# Altium schematic symbol library TitansLib.SchLib: 462 symbols (part 21 of 24)
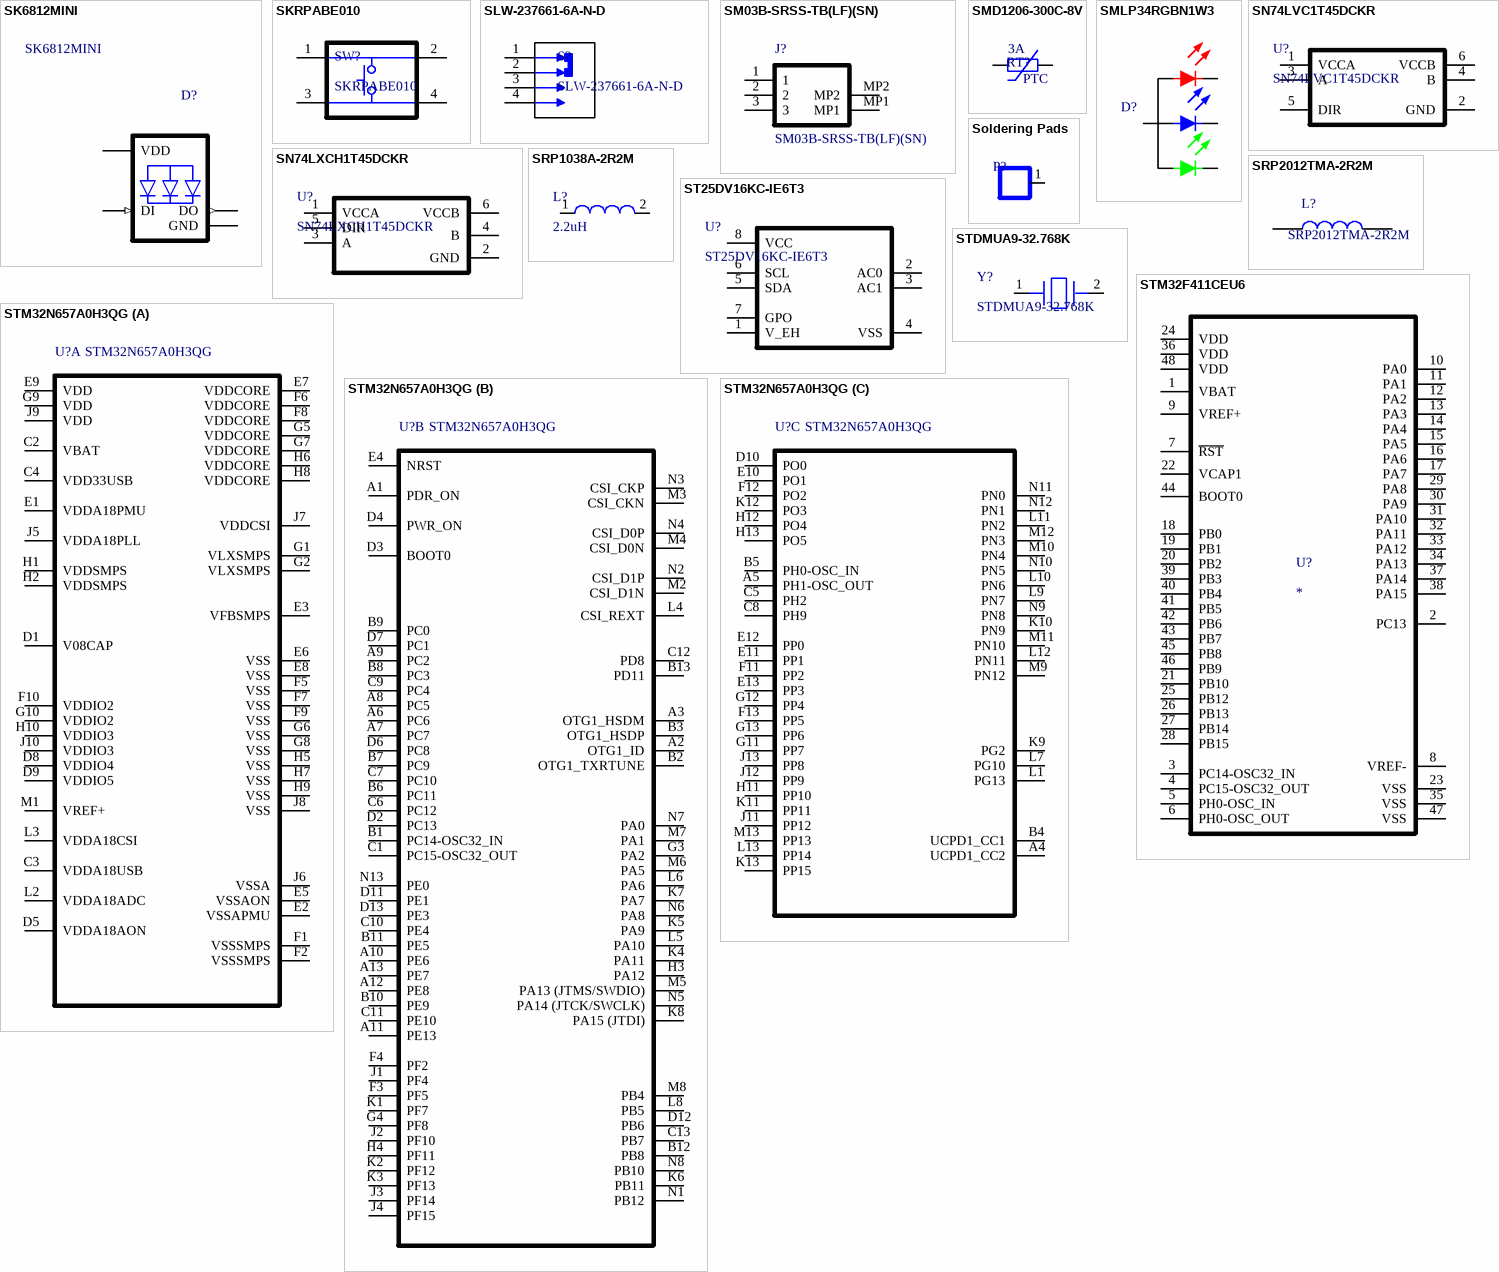
[diagram p37: symbols SK6812MINI to STM32N657A0H3QG]

## SLW-237661-6A-N-D
designator S?
Switch Slide ON ON ON SP3T Raised Slide 0.5A 50VDC 10000Cycles PC Pins Thru-Hole; MF: Same Sky; Number of Positions: 3; SnapEDA_Link: https://www.snapeda.com/parts/SLW-237661-6A-N-D/Same+Sky/view-part/?ref=snap; Package: Package; Value: *; MP: SLW-237661-6A-N-D; Check_prices: https://www.snapeda.com/parts/SLW-237661-6A-N-D/Same+Sky/view-part/?ref=eda; Supplier 1: DigiKey; Supplier Part Number 1: 2223-SLW-237661-6A-N-D-ND; Supplier 2: Mouser; Supplier Part Number 2: 179-SLW2376616AND; Supplier: DigiKey; Supplier Part Number: 2223-SLW-237661-6A-N-D-ND; Manufacturer: Same Sky; Manufacturer Part Number: SLW-237661-6A-N-D; RoHS: Compliant; Category: Slide Switches; Stock: 1241; Pricing: 1=0,45, 10=0,385, 25=0,3588, 100=0,3209, 250=0,29732, 500=0,2806, 1000=0,26508, 2500=0,24654, 5000=0,23406 (USD); Lifecycle Status: Production; REACH SVHC: Yes; ComponentLink1URL: https://datasheet.octopart.com:443/SLW-237661-6A-N-D-Same-Sky-datasheet-188843315.pdf?src-supplier=Same+Sky; ComponentLink1Description: https://datasheet.octopart.com:443/SLW-237661-6A-N-D-Same-Sky-datasheet-188843315.pdf?src-supplier=Same+Sky; ComponentLink2URL: https://datasheet.octopart.com:443/SLW-237661-6A-N-D-Same-Sky-datasheet-181919987.pdf?src-supplier=Same+Sky; ComponentLink2Description: https://datasheet.octopart.com:443/SLW-237661-6A-N-D-Same-Sky-datasheet-181919987.pdf?src-supplier=Same+Sky; ComponentLink3URL: https://datasheet.octopart.com:443/SLW-237661-6A-N-D-Same-Sky-datasheet-181919988.pdf?src-supplier=Same+Sky; ComponentLink3Description: https://datasheet.octopart.com:443/SLW-237661-6A-N-D-Same-Sky-datasheet-181919988.pdf?src-supplier=Same+Sky; ComponentLink4URL: https://datasheet.octopart.com:443/SLW-237661-6A-N-D-Same-Sky-datasheet-187907087.pdf?src-supplier=Master+Electronics; ComponentLink4Description: https://datasheet.octopart.com:443/SLW-237661-6A-N-D-Same-Sky-datasheet-187907087.pdf?src-supplier=Master+Electronics; ComponentLink5URL: https://datasheet.octopart.com:443/SLW-237661-6A-N-D-Same-Sky-datasheet-188930936.pdf?src-supplier=TME; ComponentLink5Description: https://datasheet.octopart.com:443/SLW-237661-6A-N-D-Same-Sky-datasheet-188930936.pdf?src-supplier=TME; ComponentLink6URL: https://octopart.com:443/opatz8j6/c1?t=8VmR57qYqZFzUCwjfwF_bp8m6JuYStFWSxgYKb2KmZYFUQYu35G3Mr7DNbX4FHYCMI8oReld9tViGdxjX3NbNbFGgfNcf7B61Q12uKcFXCvXZ4vwcgaowTwEQBiYxdkGS8k8Zg4YENuxHQUxI7FNZMPyKdAXuIKjEn-TT_c2HAbh59xYTp1iHVKx3RFb70iK0Zcqlq2flhOVkGlHn2Nfd12VimO5IFTjlUn-mP1NsdE3qS1rzAeuI5--aTga4DrNEoiPtC4zE42i93sm7OhU0IK7p-wXkn5M_VylD1MTowfgw9xzP495MZzSfEjA3EBr3b9OxaVEki3RN3auUTfzeSg2CT77e_rS7BXPsLVVp2i2lQ&src-supplier=Compliance+Statements; ComponentLink6Description: https://octopart.com:443/opatz8j6/c1?t=8VmR57qYqZFzUCwjfwF_bp8m6JuYStFWSxgYKb2KmZYFUQYu35G3Mr7DNbX4FHYCMI8oReld9tViGdxjX3NbNbFGgfNcf7B61Q12uKcFXCvXZ4vwcgaowTwEQBiYxdkGS8k8Zg4YENuxHQUxI7FNZMPyKdAXuIKjEn-TT_c2HAbh59xYTp1iHVKx3RFb70iK0Zcqlq2flhOVkGlHn2Nfd12VimO5IFTjlUn-mP1NsdE3qS1rzAeuI5--aTga4DrNEoiPtC4zE42i93sm7OhU0IK7p-wXkn5M_VylD1MTowfgw9xzP495MZzSfEjA3EBr3b9OxaVEki3RN3auUTfzeSg2CT77e_rS7BXPsLVVp2i2lQ&src-supplier=Compliance+Statements; ComponentLink7URL: https://octopart.com:443/opatz8j6/c1?t=AZK7bskjWbm11iZNnGpfdb6_Q6h8MakJeavAaVBavs5Uh-JSDuNRoUuF82tE1NPecDxPSVxQiQXRK5PviMJ7CbBucgg_ebF37rz9sMILUO-WnpZZuA7SZCi4vSpJ6B5tDMk3_Klva_iG8PQUIowosImMaPA_vNSPcVevJkmiCvDymj1uv4rAgumFo92n7RxdXdHsTws24BVi-VG6QquDPYTnGBuGJZOftetvyH8ySqM4a1qs4NJmmuZXZbWHpKmLM2lMWCUIt6_bDBVLt25wBJRfIt7nPLGp6zSCT6Db85bpnQ2QXRXe3bpQW5JcuKS1-GM65dyXJ8xuhrQ2VHD_y_xMppbagHEE8FBl8_ZBcA8SUQ&src-supplier=Compliance+Statements; ComponentLink7Description: https://octopart.com:443/opatz8j6/c1?t=AZK7bskjWbm11iZNnGpfdb6_Q6h8MakJeavAaVBavs5Uh-JSDuNRoUuF82tE1NPecDxPSVxQiQXRK5PviMJ7CbBucgg_ebF37rz9sMILUO-WnpZZuA7SZCi4vSpJ6B5tDMk3_Klva_iG8PQUIowosImMaPA_vNSPcVevJkmiCvDymj1uv4rAgumFo92n7RxdXdHsTws24BVi-VG6QquDPYTnGBuGJZOftetvyH8ySqM4a1qs4NJmmuZXZbWHpKmLM2lMWCUIt6_bDBVLt25wBJRfIt7nPLGp6zSCT6Db85bpnQ2QXRXe3bpQW5JcuKS1-GM65dyXJ8xuhrQ2VHD_y_xMppbagHEE8FBl8_ZBcA8SUQ&src-supplier=Compliance+Statements
footprint SW_SLW-237661-6A-N-D
pins: 1, 2, 3, 4

## SM03B-SRSS-TB(LF)(SN)
designator J?
Headers & Wire Housings SR HEADER (SMT SIDE; Manufacturer 1: JST; Suppler Unit Price 1: 0.76; Datasheet: https://www.mouser.com/datasheet/3/1070/1/eSR_SZ.pdf; Height: 2.9mm; Manufacturer Part Number 1: SM03B-SRSS-TB(LF)(SN); Supplier Part Number 1: 306-SM03BSRSSTBLFSNP; Supplier 1: Mouser; Supplier Link 1: https://www.mouser.com/ProductDetail/JST-Commercial/SM03B-SRSS-TBLFSN?qs=cdbOS8ANM9DY%2Fg%2FPQv5Kng%3D%3D&srsltid=AfmBOopfIpsxvT8dLfiZVy8RRoHGpUzlDbmxgDkX76WziTOqbMIDqSse
footprint SM03BSRSSTBLFSN
pins: 1, 2, 3, MP1, MP2

## SMD1206-300C-8V
designator RT?, comment 3A
PTC RESET FUSE 8V 3A 1206; Manufacturer: BNStar; Manufacturer Part Number: SMD1206-300C-8V; Supplier Part Number: C2760277; Supplier Unit Price: 0.044; Supplier: LCSC; Supplier Link: https://www.lcsc.com/product-detail/C2760277.html?spm=wm.fly.bg.0.xh&lcsc_vid=RlMKX1cDFlQIVwFVR1VaUgJQQ1MIVlJQQlAMAl1TE1AxVlNeQ1BaX1RWR1VWVjsOAxUeFF5JWBYZEEoBGA4JCwFIFA4DSA%3D%3D; Value: 3A
footprint PTC_3A_1206
pins: 1, 2
text: PTC

## SMLP34RGBN1W3
designator D?  (value not drawn)
Triple Color LED, Ultra Hi-brt Red/ultra Hi-brt Green/ultra Hi-brt Blue, Milky White, 1mm; Manufacturer: ROHM; Forward Current: 10mA; Forward Voltage: 1.9V; Number of Circuits: 1; Reverse Voltage: 5V; Shape: Square; Supplier 1: DigiKey; Supplier Part Number 1: 846-SMLP34RGBN1W3CT-ND; Supplier 2: DigiKey; Supplier Part Number 2: 846-SMLP34RGBN1W3DKR-ND; Supplier 3: Mouser; Supplier Part Number 3: 755-SMLP34RGBN1W3; Supplier: DigiKey; Supplier Part Number: 846-SMLP34RGBN1W3CT-ND; Manufacturer Part Number: SMLP34RGBN1W3; RoHS: Compliant; Category: LEDs; Stock: 31242; Pricing: 1=1,12, 10=0,812, 25=0,734, 100=0,6483, 250=0,60736, 500=0,58266, 1000=0,56234, 2500=0,54089 (USD); Export Control Classification Number (ECCN) Code: EAR99; Height: 200µm; Harmonized Tariff Schedule (HTS) Code: 8541.40.20.00; Introduction Date: 2021-07-13; Lifecycle Status: Production; Max Operating Temperature: 85°C; Min Operating Temperature: -40°C; Mounting Technology: Surface Mount; Number of Terminals: 4; REACH SVHC: Yes; Terminal Pitch: 650µm; ComponentLink1URL: https://datasheet.octopart.com:443/SMLP34RGBN1W3-ROHM-datasheet-181230668.pdf?src-supplier=IHS; ComponentLink1Description: https://datasheet.octopart.com:443/SMLP34RGBN1W3-ROHM-datasheet-181230668.pdf?src-supplier=IHS; ComponentLink2URL: https://datasheet.octopart.com:443/SMLP34RGBN1W3-ROHM-datasheet-181962876.pdf?src-supplier=Farnell; ComponentLink2Description: https://datasheet.octopart.com:443/SMLP34RGBN1W3-ROHM-datasheet-181962876.pdf?src-supplier=Farnell
pins: 1 31, 2 32, 3 32, 4 32

## SN74LVC1T45DCKR
designator U?
Bus Transceiver, LVC/LCX/Z Series, 1-Func, 1-Bit, True Output, CMOS, PDSO6; Manufacturer: Texas Instruments; Package Body Material: Plastic; Control Type: COMMON CONTROL; Count Direction: Bidirectional; Load/Preset Input: Yes; Max I(ol): 24mA; Number of Bits: 1; Number of Ports: 2; Output Characteristics: 3-STATE; Package Equivalence Code: TSSOP6,.08; Power Supplies: 3.3V; Propagation Delay (tpd): 17.7ns; Max Supply Voltage: 5.5V; Min Supply Voltage: 1.65V; Nominal Supply Voltage: 1.8V; Qualification Status: Not Qualified; Supplier: Digikey; Supplier Part Number: 296-16844-1-ND; Manufacturer Part Number: SN74LVC1T45DCKR; RoHS: Yes; Category: Voltage Level Shifters; Stock: 137404; Pricing: 1=0.46, 10=0.323, 25=0.288, 100=0.2498, 250=0.23164, 500=0.22064, 1000=0.21267 (USD); Case/Package: TSSOP; Pins: 6; Package Shape: Rectangular; Terminal Finish: Nickel; Min Operating Temperature: -40°C; Max Operating Temperature: 85°C; JESD-609 Code: e4; Output Polarity: True; JESD-30 Code: R-PDSO-G6; Logic Type: BUS TRANSCEIVER; Moisture Sensitivity Level: 1; Channels: 1; Package Style: SMALL OUTLINE, THIN PROFILE, SHRINK PITCHMeter; Packaging: Tape and Reel; Peak Reflow Temperature (Cel): 260°C; Surface Mount: Yes; Technology: CMOS; Terminal Form: Gull Wing; Terminal Position: DUAL; Length: 2mm; Width: 1.25mm; Height - Seated (Max): 1.1mm; Terminal Pitch: 0.65mm; Temperature Grade: INDUSTRIAL; Reach SVHC Compliant: Yes; RoHS Compliant: Yes; ComponentLink1URL: https://www.ti.com:443/lit/ds/symlink/sn74lvc1t45.pdf?src-supplier=IHS+Markit; ComponentLink1Description: https://www.ti.com:443/lit/ds/symlink/sn74lvc1t45.pdf?src-supplier=IHS+Markit; ComponentLink2URL: https://datasheet.ciiva.com/15086/getdatasheetpartid-190116-15086313.pdf?src-supplier=Verical; ComponentLink2Description: https://datasheet.ciiva.com/15086/getdatasheetpartid-190116-15086313.pdf?src-supplier=Verical; ComponentLink3URL: https://datasheet.ciiva.com/36526/2000557-36526242.pdf?src-supplier=Jameco; ComponentLink3Description: https://datasheet.ciiva.com/36526/2000557-36526242.pdf?src-supplier=Jameco; ComponentLink4URL: https://datasheet.ciiva.com/7744/1814968-7744166.pdf?src-supplier=Element14; ComponentLink4Description: https://datasheet.ciiva.com/7744/1814968-7744166.pdf?src-supplier=Element14; ComponentLink5URL: https://datasheet.ciiva.com/1899/sn74lvc1t45-1899257.pdf?src-supplier=Digikey; ComponentLink5Description: https://datasheet.ciiva.com/1899/sn74lvc1t45-1899257.pdf?src-supplier=Digikey; ComponentLink6URL: https://datasheet.ciiva.com/1899/sn74lvc1t45-1899258.pdf?src-supplier=Digikey; ComponentLink6Description: https://datasheet.ciiva.com/1899/sn74lvc1t45-1899258.pdf?src-supplier=Digikey; ComponentLink7URL: https://datasheet.ciiva.com/1899/sn74lvc1t45-1899259.pdf?src-supplier=Digikey; ComponentLink7Description: https://datasheet.ciiva.com/1899/sn74lvc1t45-1899259.pdf?src-supplier=Digikey; ComponentLink8URL: https://datasheet.ciiva.com/14300/sn74lvc1t45-14300773.pdf?src-supplier=Avnet; ComponentLink8Description: https://datasheet.ciiva.com/14300/sn74lvc1t45-14300773.pdf?src-supplier=Avnet; ComponentLink9URL: https://datasheet.ciiva.com/7293/1862463-7293671.pdf?src-supplier=Newark; ComponentLink9Description: https://datasheet.ciiva.com/7293/1862463-7293671.pdf?src-supplier=Newark; ComponentLink10URL: https://datasheet.ciiva.com/48703/001073763-da-01-en-ic-bus-trans-sn74lvc1t45dckr-sc-70-6-tid-48703349.pdf?src-supplier=Conrad; ComponentLink10Description: https://datasheet.ciiva.com/48703/001073763-da-01-en-ic-bus-trans-sn74lvc1t45dckr-sc-70-6-tid-48703349.pdf?src-supplier=Conrad
footprint SOT65P210X110-6N (SOT23, 6-Leads, Body 2.00x2.10mm, Pitch 0.65mm, IPC Medium Density)
pins: 1 VCCA, 2 GND, 3 A, 4 B, 5 DIR, 6 VCCB

## SN74LXCH1T45DCKR
designator U?
Single-bit dual-supply transceiver with configurable voltage-level shifting 6-SC70 -40 to 125; Manufacturer: Texas Instruments; Manufacturer Lifecycle Status: ACTIVE; Data Rate: 420Mbps; Max Junction Temperature (Tj): 150°C; Nominal Supply Current: 3µA; Number of Bits: 1; Propagation Delay: 11ns; Topology: Push-Pull; Supplier: DigiKey; Supplier Part Number: 296-SN74LXCH1T45DCKRCT-ND; Manufacturer Part Number: SN74LXCH1T45DCKR; RoHS: Compliant; Category: Voltage Level Shifters; Stock: 3155; Pricing: 1=0.67, 10=0.473, 25=0.4244, 100=0.3711, 250=0.34556, 500=0.33016, 1000=0.32436 (USD); Ambient Temperature Range High: 125°C; Height: 1.1mm; Length: 2mm; Lifecycle Status: Production; Max Operating Temperature: 125°C; Min Operating Temperature: -40°C; Number of Circuits: 1; Number of Inputs: 1; Number of Outputs: 1; Pins: 6; Thickness: 900µm; Width: 1.25mm; ComponentLink1URL: https://octopart.com:443/opatz8j6/c1?t=Q569tHSjaj1zDgVJg-7m9sm-kh_ek9iRnXusho9QMoevz2mmcR9LhMcLdA-ONU2poXBdUb9Msvxh0FVyrrqpo1Dz3Swg2etjiHL7zcgSVt9dFh5FuB62_2qgeqwLRMO4C4gi-7cVfXy0AEA8Dt3YsT_MxOeEKQMLdObwaWzkqlaCPR8y75jOk8o6gf1LL7TXuSatyjalP8TRlF5sWeqEuXGlYodzmtrFHIiPiB-IkzQnCJh3GYqttfs84lS6npvRpqYbvQUvXsq3TJtKA8z2AFgAY_sOBxY9HnELkmDqBRorIt_hF-YiLbDT0cbf6S5ToZ2f-Ecf05XofHLyttMSMFL0B4Jtqc0mNF5X-QcUn7-Fx0c9RCF4fIxWhiQmBARgMB_kmWK4M0FRMPE&src-supplier=Texas+Instruments; ComponentLink1Description: https://octopart.com:443/opatz8j6/c1?t=Q569tHSjaj1zDgVJg-7m9sm-kh_ek9iRnXusho9QMoevz2mmcR9LhMcLdA-ONU2poXBdUb9Msvxh0FVyrrqpo1Dz3Swg2etjiHL7zcgSVt9dFh5FuB62_2qgeqwLRMO4C4gi-7cVfXy0AEA8Dt3YsT_MxOeEKQMLdObwaWzkqlaCPR8y75jOk8o6gf1LL7TXuSatyjalP8TRlF5sWeqEuXGlYodzmtrFHIiPiB-IkzQnCJh3GYqttfs84lS6npvRpqYbvQUvXsq3TJtKA8z2AFgAY_sOBxY9HnELkmDqBRorIt_hF-YiLbDT0cbf6S5ToZ2f-Ecf05XofHLyttMSMFL0B4Jtqc0mNF5X-QcUn7-Fx0c9RCF4fIxWhiQmBARgMB_kmWK4M0FRMPE&src-supplier=Texas+Instruments; ComponentLink2URL: https://sigma.octopart.com:443/182282881/technical_drawing/Texas-Instruments-SN74LXCH1T45DCKR.pdf?src-supplier=Texas+Instruments; ComponentLink2Description: https://sigma.octopart.com:443/182282881/technical_drawing/Texas-Instruments-SN74LXCH1T45DCKR.pdf?src-supplier=Texas+Instruments; ComponentLink3URL: https://sigma.octopart.com:443/178868976/technical_drawing/Texas-Instruments-SN74LXCH1T45DCKR.pdf?src-supplier=Texas+Instruments; ComponentLink3Description: https://sigma.octopart.com:443/178868976/technical_drawing/Texas-Instruments-SN74LXCH1T45DCKR.pdf?src-supplier=Texas+Instruments; ComponentLink4URL: https://datasheet.octopart.com:443/SN74LXCH1T45DCKR-Texas-Instruments-datasheet-184713126.pdf?src-supplier=Upverter; ComponentLink4Description: https://datasheet.octopart.com:443/SN74LXCH1T45DCKR-Texas-Instruments-datasheet-184713126.pdf?src-supplier=Upverter; ComponentLink5URL: https://datasheet.octopart.com:443/SN74LXCH1T45DCKR-Texas-Instruments-datasheet-182826091.pdf?src-supplier=LCSC; ComponentLink5Description: https://datasheet.octopart.com:443/SN74LXCH1T45DCKR-Texas-Instruments-datasheet-182826091.pdf?src-supplier=LCSC; ComponentLink6URL: https://datasheet.octopart.com:443/SN74LXCH1T45DCKR-Texas-Instruments-datasheet-165811838.pdf?src-supplier=SHENGYU+ELECTRONICS; ComponentLink6Description: https://datasheet.octopart.com:443/SN74LXCH1T45DCKR-Texas-Instruments-datasheet-165811838.pdf?src-supplier=SHENGYU+ELECTRONICS; ComponentLink7URL: http://sigma.octopart.com:80/reach_statement/Texas-Instruments-company-64.pdf?src-supplier=Compliance+Statements; ComponentLink7Description: http://sigma.octopart.com:80/reach_statement/Texas-Instruments-company-64.pdf?src-supplier=Compliance+Statements; ComponentLink8URL: http://sigma.octopart.com:80/conflict_mineral_statement/Texas-Instruments-company-63.pdf?src-supplier=Compliance+Statements; ComponentLink8Description: http://sigma.octopart.com:80/conflict_mineral_statement/Texas-Instruments-company-63.pdf?src-supplier=Compliance+Statements; Supplier 1: DigiKey; Supplier Part Number 1: 296-SN74LXCH1T45DCKRCT-ND; Supplier 2: DigiKey; Supplier Part Number 2: 296-SN74LXCH1T45DCKRTR-ND; Supplier 3: Mouser; Supplier Part Number 3: 595-SN74LXCH1T45DCKR
footprint SOT65P210X110-6N (SOT23, 6-Leads, Body 2.00x2.10mm, Pitch 0.65mm, IPC Medium Density)
pins: 1 VCCA, 2 GND, 3 A, 4 B, 5 DIR, 6 VCCB

## Soldering Pads
designator P?, comment Soldering Pad  (value not drawn)  (no BOM)
1mm X 1mm Generic Soldering Pad.
footprint SOLDER PAD 3X3MM (Soldering Pad of 3X3mm.)
pins: 1

## SRP1038A-2R2M
designator L?, comment 2.2uH
General Purpose Inductor, 2.2uH, 20%, 1 Element, Carbonyl Powder-Core, SMD, 4339; Manufacturer: Bourns; Manufacturer Part Number: SRP1038A-2R2M; Case/Size Code: 3939; DC Resistance (DCR): 7mR; Inductor Application: POWER INDUCTOR; Channels: 1; Quality Factor-Min (at L-nom): 20; Max Current Rating: 12A; Self Resonant Frequency: 25MHz; Shape/Size Description: RECTANGULAR PACKAGE; Shielding: Shielded; Test Frequency: 100kHz; Package Height: 3.8mm; Package Length: 11mm; Package Width: 10mm; Reference Standard: AEC-Q200; Supplier: Newark; Supplier Part Number: 78X5364; RoHS: Yes; Category: Fixed Inductors; Stock: 22; Pricing: 1=1.39, 10=1.19 (USD); Pins: 2; Core Material: Carbonyl Powder; Terminal Finish: Tin; Min Operating Temperature: -40°C; Max Operating Temperature: 150°C; Tolerance: 20%; JESD-609 Code: e3; Construction: Shielded; Inductance-Nom (L): 2.2uH; Inductor Type: GENERAL PURPOSE INDUCTOR; Package Style: SMTMeter; Packaging: Tape and Reel; Surface Mount: Yes; Terminal Placement: Dual Ended; Termination: Wraparound; Reach SVHC Compliant: Yes; RoHS Compliant: Yes; ComponentLink1URL: https://datasheet.ciiva.com:443/pdfs/VipMasterIC/IC/BOUR/BOUR-S-A0008248883/BOUR-S-A0008248883-1.pdf?src-supplier=IHS+Markit; ComponentLink1Description: https://datasheet.ciiva.com:443/pdfs/VipMasterIC/IC/BOUR/BOUR-S-A0008248883/BOUR-S-A0008248883-1.pdf?src-supplier=IHS+Markit; ComponentLink2URL: https://datasheet.ciiva.com/48685/srp1038a-48685398.pdf?src-supplier=Avnet; ComponentLink2Description: https://datasheet.ciiva.com/48685/srp1038a-48685398.pdf?src-supplier=Avnet; ComponentLink3URL: https://datasheet.ciiva.com/46437/1828822-46437452.pdf?src-supplier=Element14; ComponentLink3Description: https://datasheet.ciiva.com/46437/1828822-46437452.pdf?src-supplier=Element14
footprint INDP110100X40N (Precision Wire Wound Inductor, 2-Leads, Body 11.00x10.00mm, IPC Medium Density)
pins: 1, 2

## SRP2012TMA-2R2M
designator L?
2.2 µH Shielded Inductor 2.5 A 126mOhm Max 0806 (2016 Metric) Flat Wire; Manufacturer_Name: Bourns; Geometry.Height: 2mm; Manufacturer_Part_Number: SRP2012TMA-2R2M; Mouser Part Number: 652-SRP2012TMA-2R2M; Mouser Price/Stock: https://www.mouser.co.uk/ProductDetail/Bourns/SRP2012TMA-2R2M?qs=t7xnP681wgV4q3Oo1ZMkoA%3D%3D; Arrow Part Number: *; Arrow Price/Stock: *; Datasheet Link: https://www.bourns.com/docs/Product-Datasheets/SRP4020TA.pdf
footprint INDC2016X12N_2
pins: 1, 2

## ST25DV16KC-IE6T3
designator U?
ST25DV16KC Series 13.56 MHz 16 kbit EEPROM Memory NFC/RFID Tag IC - TSSOP-8; Manufacturer: STMicroelectronics; Supplier: Avnet; Supplier Part Number: ST25DV16KC-IE6T3; Manufacturer Part Number: ST25DV16KC-IE6T3; RoHS: No; Stock: 32000; Pricing: 4000=0.60714, 8000=0.57432, 16000=0.55921, 24000=0.54487, 32000=0.53125 (USD)
footprint TSOP65P640X120-8N (TSOP, 8-Leads, Body 3.00x4.40mm, Pitch 0.65mm, IPC Medium Density)
pins: 1 V_EH, 2 AC0, 3 AC1, 4 VSS, 5 SDA, 6 SCL, 7 GPO, 8 VCC

## STDMUA9-32.768K
designator Y?
Crystal 32.7680KHZ 9PF SMD; Manufacturer: NDK; Supplier: DigiKey; Supplier Part Number: 644-STDMUA9-32.768KCT-ND; Manufacturer Part Number: STDMUA9-32.768K; Category: Crystals; Stock: 30813; Pricing: 1=0.63, 10=0.549, 25=0.5188, 50=0.4974, 100=0.4768, 250=0.45088, 500=0.43222, 1000=0.41434 (USD); Supplier 1: DigiKey; Supplier Part Number 1: 644-STDMUA9-32.768KCT-ND; Supplier 2: DigiKey; Supplier Part Number 2: 644-STDMUA9-32.768KTR-ND; Supplier 3: Mouser; Supplier Part Number 3: 344-STDMUA9-32.768K
pins: 1, 2

## STM32F411CEU6
designator U?
MCU 32-bit ARM Cortex M4 RISC 512KB Flash 3.3V 48-Pin UFQFPN EP Frame; Manufacturer: STMicroelectronics; Manufacturer Part Number: STM32F411CEU6; ADC Channels (Resolution): 10-Ch 12-Bit; Core Architecture: ARM Cortex-M4; Data Bus Width: 32b; EEPROM Memory Size: 0B; Frequency: 100MHz; Interface: SDIO, USB; Clock Frequency: 26MHz; Max Power Dissipation: 625mW; Max Supply Current: 34.5mA; Max Supply Voltage: 3.6V; Min Supply Voltage: 1.7V; Nominal Supply Current: 1.8µA; Number of A/D Converters: 1; Number of ADC Channels: 16; Number of Channels: 10; Number of I2C Channels: 3; Number of I/Os: 36; Number of SPI Channels: 5; Number of Timers/Counters: 2; Oscillator Type: Internal; Peripherals: POR; RAM Size: 128kB; Watchdog Timer: Yes; Supplier: Future Electronics; Supplier Part Number: STM32F411CEU6; RoHS: Compliant; Category: Microcontrollers; Stock: 1560; Pricing: 260=2,92 (USD); Case/Package: UFQFPN; China RoHS: Compliant; Country of Origin: Mainland China, Malaysia, Taiwan; Export Control Classification Number (ECCN) Code: 3A991.A.2; Flash Memory Size: 512kB; Height - Seated (Max): 600µm; Harmonized Tariff Schedule (HTS) Code: 8542.31.00.25; Introduction Date: 2014-06-19; Lead Free: Lead Free; Length: 7mm; Lifecycle Status: Production; Max Operating Temperature: 85°C; Memory Size: 512kB; Memory Format: FLASH; Min Operating Temperature: -40°C; Mounting Technology: Surface Mount; Nominal Supply Voltage (DC): 3.3V; Number of Interrupts: 16; Pins: 48; Number of Programmable I/O: 36; Number of Terminals: 48; Number of USART Channels: 3; Operating Supply Voltage: 3.3V; Packaging: Cut Tape; Radiation Hardening: No; REACH SVHC: Yes; Schedule B: 8542310000, 8542310000|8542310000|8542310000|8542310000|8542310000|8542310000|8542310000|8542310000|8542310000|8542310000|8542310000|8542310000|8542310000|8542310000|8542310000|8542310000|8542310000|8542310000|8542310000|8542310000|8542310000|8542310000|8542310000|85; Temperature Grade: Industrial; Terminal Pitch: 500µm; Width: 7mm; ComponentLink1URL: https://datasheet.octopart.com:443/STM32F411CEU6-STMicroelectronics-datasheet-41919523.pdf?src-supplier=element14+APAC; ComponentLink1Description: https://datasheet.octopart.com:443/STM32F411CEU6-STMicroelectronics-datasheet-41919523.pdf?src-supplier=element14+APAC; ComponentLink2URL: https://datasheet.octopart.com:443/STM32F411CEU6-STMicroelectronics-datasheet-27102711.pdf?src-supplier=Upverter; ComponentLink2Description: https://datasheet.octopart.com:443/STM32F411CEU6-STMicroelectronics-datasheet-27102711.pdf?src-supplier=Upverter; ComponentLink3URL: https://datasheet.octopart.com:443/STM32F411CEU6-STMicroelectronics-datasheet-114750309.pdf?src-supplier=Newark; ComponentLink3Description: https://datasheet.octopart.com:443/STM32F411CEU6-STMicroelectronics-datasheet-114750309.pdf?src-supplier=Newark; ComponentLink4URL: https://datasheet.octopart.com:443/STM32F411CEU6-STMicroelectronics-datasheet-34219326.pdf?src-supplier=Newark; ComponentLink4Description: https://datasheet.octopart.com:443/STM32F411CEU6-STMicroelectronics-datasheet-34219326.pdf?src-supplier=Newark; ComponentLink5URL: https://datasheet.octopart.com:443/STM32F411CEU6-STMicroelectronics-datasheet-82511007.pdf?src-supplier=SHENGYU+ELECTRONICS; ComponentLink5Description: https://datasheet.octopart.com:443/STM32F411CEU6-STMicroelectronics-datasheet-82511007.pdf?src-supplier=SHENGYU+ELECTRONICS
footprint STM-UFQFPN48_L (QFN, 48-Leads, Body 7.1x7.1mm, Pitch 0.5mm, Thermal Pad 5.6x5.6mm, IPC High Density)
footprint STM-UFQFPN48_M (QFN, 48-Leads, Body 7.1x7.1mm, Pitch 0.5mm, Thermal Pad 5.6x5.6mm, IPC Low Density)
footprint STM-UFQFPN48_N (QFN, 48-Leads, Body 7.1x7.1mm, Pitch 0.5mm, Thermal Pad 5.6x5.6mm, IPC Medium Density)
pins: 1 VBAT, 2 PC13, 3 PC14-OSC32_IN, 4 PC15-OSC32_OUT, 5 PH0-OSC_IN, 6 PH0-OSC_OUT, 7 ~{RST}, 8 VREF-, 9 VREF+, 10 PA0, 11 PA1, 12 PA2, 13 PA3, 14 PA4, 15 PA5, 16 PA6, 17 PA7, 18 PB0, 19 PB1, 20 PB2, 21 PB10, 22 VCAP1, 23 VSS, 24 VDD, 25 PB12, 26 PB13, 27 PB14, 28 PB15, 29 PA8, 30 PA9, 31 PA10, 32 PA11, 33 PA12, 34 PA13, 35 VSS, 36 VDD, 37 PA14, 38 PA15, 39 PB3, 40 PB4, 41 PB5, 42 PB6, 43 PB7, 44 BOOT0, 45 PB8, 46 PB9, 47 VSS, 48 VDD

## STM32N657A0H3QG
designator U?
Arm Cortex-M55-based MCU, with ST Neural-ART Accelerator, H264 encoder, Neo-Chrom 2.5D GPU, 4.2 Mbytes contiguous SRAM; Manufacturer_Name: STMicroelectronics; Geometry.Height: 1mm; Manufacturer_Part_Number: STM32N657A0H3QG; Mouser Part Number: *; Mouser Price/Stock: *; Arrow Part Number: STM32N657A0H3QG; Arrow Price/Stock: https://www.arrow.com/en/products/stm32n657a0h3qg/stmicroelectronics.html?utm_currency=USD&region=nac; Datasheet Link: https://www.st.com/resource/en/datasheet/stm32n657a0.pdf
footprint STM32N657A0H3Q
part A pins: C2 VBAT, C3 VDDA18USB, C4 VDD33USB, D1 V08CAP, D5 VDDA18AON, D8 VDDIO4, D9 VDDIO5, E1 VDDA18PMU, E2 VSSAPMU, E3 VFBSMPS, E5 VSSAON, E6 VSS, E7 VDDCORE, E8 VSS, E9 VDD, F1 VSSSMPS, F2 VSSSMPS, F5 VSS, F6 VDDCORE, F7 VSS, F8 VDDCORE, F9 VSS, F10 VDDIO2, G1 VLXSMPS, G2 VLXSMPS, G5 VDDCORE, G6 VSS, G7 VDDCORE, G8 VSS, G9 VDD, G10 VDDIO2, H1 VDDSMPS, H2 VDDSMPS, H5 VSS, H6 VDDCORE, H7 VSS, H8 VDDCORE, H9 VSS, H10 VDDIO3, J5 VDDA18PLL, J6 VSSA, J7 VDDCSI, J8 VSS, J9 VDD, J10 VDDIO3, L2 VDDA18ADC, L3 VDDA18CSI, M1 VREF+
part B pins: A1 PDR_ON, A2 OTG1_ID, A3 OTG1_HSDM, A6 PC6, A7 PC7, A8 PC5, A9 PC2, A10 PE6, A11 PE13, A12 PE8, A13 PE7, B1 PC14-OSC32_IN, B2 OTG1_TXRTUNE, B3 OTG1_HSDP, B6 PC11, B7 PC9, B8 PC3, B9 PC0, B10 PE9, B11 PE5, B12 PB8, B13 PD11, C1 PC15-OSC32_OUT, C6 PC12, C7 PC10, C9 PC4, C10 PE4, C11 PE10, C12 PD8, C13 PB7, D2 PC13, D3 BOOT0, D4 PWR_ON, D6 PC8, D7 PC1, D11 PE1, D12 PB6, D13 PE3, E4 NRST, F3 PF5, F4 PF2, G3 PA2, G4 PF8, H3 PA12, H4 PF11, J1 PF4, J2 PF10, J3 PF14, J4 PF15, K1 PF7, K2 PF12, K3 PF13, K4 PA11, K5 PA9, K6 PB11, K7 PA7, K8 PA15 (JTDI), L4 CSI_REXT, L5 PA10, L6 PA6, L8 PB5, M2 CSI_D1N, M3 CSI_CKN, M4 CSI_D0N, M5 PA13 (JTMS/SWDIO), M6 PA5, M7 PA1, M8 PB4, N1 PB12, N2 CSI_D1P, N3 CSI_CKP, N4 CSI_D0P, N5 PA14 (JTCK/SWCLK), N6 PA8, N7 PA0, N8 PB10, N13 PE0
part C pins: A4 UCPD1_CC2, A5 PH1-OSC_OUT, B4 UCPD1_CC1, B5 PH0-OSC_IN, C5 PH2, C8 PH9, D10 PO0, E10 PO1, E11 PP1, E12 PP0, E13 PP3, F11 PP2, F12 PO2, F13 PP5, G11 PP7, G12 PP4, G13 PP6, H11 PP10, H12 PO4, H13 PO5, J11 PP12, J12 PP9, J13 PP8, K9 PG2, K10 PN9, K11 PP11, K12 PO3, K13 PP15, L1 PG13, L7 PG10, L9 PN7, L10 PN6, L11 PN2, L12 PN11, L13 PP14, M9 PN12, M10 PN4, M11 PN10, M12 PN3, M13 PP13, N9 PN8, N10 PN5, N11 PN0, N12 PN1

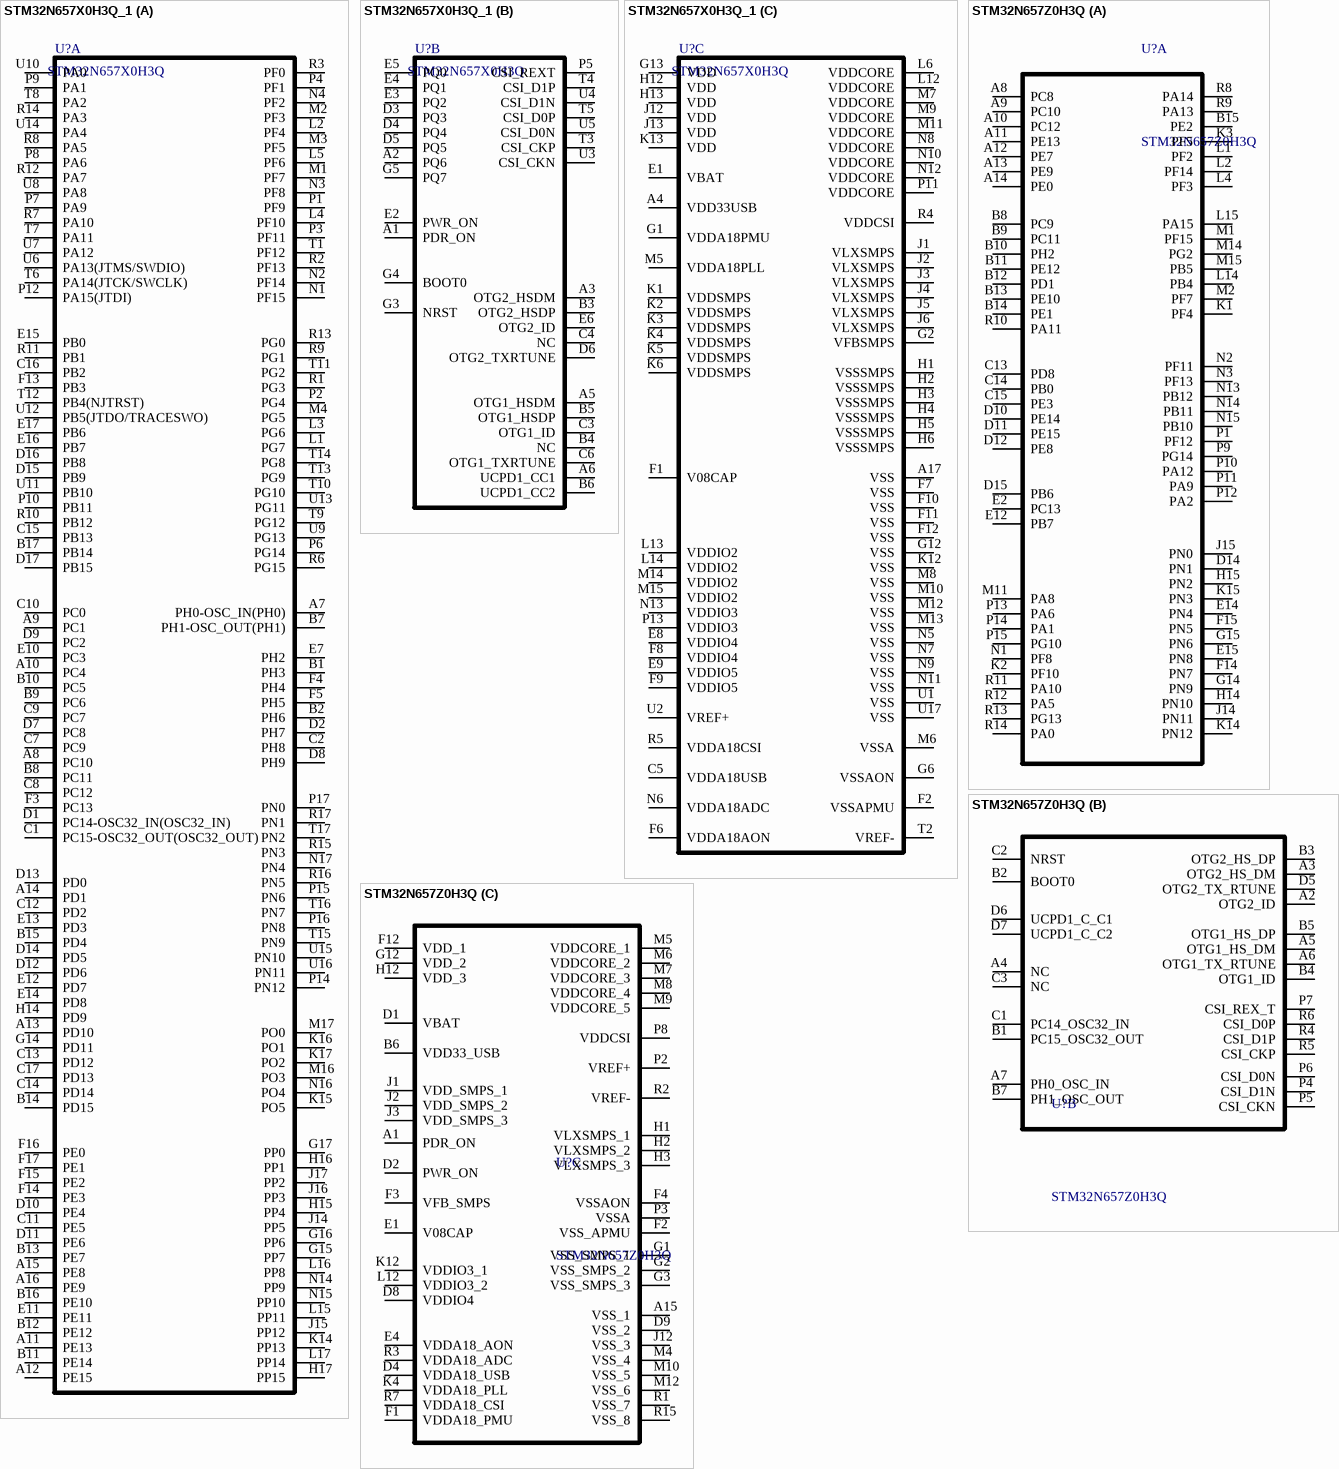
[diagram p13: symbols STM32N657X0H3Q_1 to STM32N657Z0H3Q]

## STM32N657X0H3Q_1
designator U?, comment STM32N657X0H3Q
STM32N6 Series 4.2 MB SRAM 800MHz 32-Bit Microcontroller - VFBGA-264; Manufacturer: STMicroelectronics; ComponentLink1URL: http://tunmcdsvn.tun.st.com/Component_Documentation_Library/Trunk/IC/STMICROELECTRONICS_STM32N657X0H3Q; Supplier: DigiKey; Supplier Part Number: 497-STM32N657X0H3Q-ND; Manufacturer Part Number: STM32N657X0H3Q; RoHS: Compliant; Category: Microcontrollers; Stock: 680; Pricing: 1=20.62, 10=16.472, 25=15.4356, 119=14.18277, 357=13.57807, 595=13.35447 (USD); Supplier 1: DigiKey; Supplier Part Number 1: 497-STM32N657X0H3Q-ND; Supplier 2: Mouser; Supplier Part Number 2: 511-STM32N657X0H3Q
footprint ICC_VFBGA264_14X14_P080
footprint ICC_VFBGA264_14X14_P080_SOCKET_IRONWOOD_SG-BGA-6112MF
part A pins: A7 PH0-OSC_IN(PH0), A8 PC10, A9 PC1, A10 PC4, A11 PE13, A12 PE15, A13 PD10, A14 PD1, A15 PE8, A16 PE9, B1 PH3, B2 PH6, B7 PH1-OSC_OUT(PH1), B8 PC11, B9 PC6, B10 PC5, B11 PE14, B12 PE12, B13 PE7, B14 PD15, B15 PD4, B16 PE10, B17 PB14, C1 PC15-OSC32_OUT(OSC32_OUT), C2 PH8, C7 PC9, C8 PC12, C9 PC7, C10 PC0, C11 PE5, C12 PD2, C13 PD12, C14 PD14, C15 PB13, C16 PB2, C17 PD13, D1 PC14-OSC32_IN(OSC32_IN), D2 PH7, D7 PC8, D8 PH9, D9 PC2, D10 PE4, D11 PE6, D12 PD6, D13 PD0, D14 PD5, D15 PB9, D16 PB8, D17 PB15, E7 PH2, E10 PC3, E11 PE11, E12 PD7, E13 PD3, E14 PD8, E15 PB0, E16 PB7, E17 PB6, F3 PC13, F4 PH4, F5 PH5, F13 PB3, F14 PE3, F15 PE2, F16 PE0, F17 PE1, G14 PD11, G15 PP7, G16 PP6, G17 PP0, H14 PD9, H15 PP4, H16 PP1, H17 PP15, J14 PP5, J15 PP12, J16 PP3, J17 PP2, K14 PP13, K15 PO5, K16 PO1, K17 PO2, L1 PG7, L2 PF4, L3 PG6, L4 PF10, L5 PF6, L15 PP11, L16 PP8, L17 PP14, M1 PF7, M2 PF3, M3 PF5, M4 PG5, M16 PO3, M17 PO0, N1 PF15, N2 PF14, N3 PF8, N4 PF2, N14 PP9, N15 PP10, N16 PO4, N17 PN4, P1 PF9, P2 PG4, P3 PF11, P4 PF1, P6 PG14, P7 PA9, P8 PA6, P9 PA1, P10 PB11, P12 PA15(JTDI), P14 PN12, P15 PN6, P16 PN8, P17 PN0, R1 PG3, R2 PF13, R3 PF0, R6 PG15, R7 PA10, R8 PA5, R9 PG1, R10 PB12, R11 PB1, R12 PA7, R13 PG0, R14 PA3, R15 PN3, R16 PN5, R17 PN1, T1 PF12, T6 PA14(JTCK/SWCLK) , T7 PA11, T8 PA2, T9 PG12, T10 PG10, T11 PG2, T12 PB4(NJTRST), T13 PG9, T14 PG8, T15 PN9, T16 PN7, T17 PN2, U6 PA13(JTMS/SWDIO), U7 PA12, U8 PA8, U9 PG13, U10 PA0, U11 PB10, U12 PB5(JTDO/TRACESWO), U13 PG11, U14 PA4, U15 PN10, U16 PN11
part B pins: A1 PDR_ON, A2 PQ6, A3 OTG2_HSDM, A5 OTG1_HSDM, A6 UCPD1_CC1, B3 OTG2_HSDP, B4 NC, B5 OTG1_HSDP, B6 UCPD1_CC2, C3 OTG1_ID, C4 NC, C6 OTG1_TXRTUNE, D3 PQ3, D4 PQ4, D5 PQ5, D6 OTG2_TXRTUNE, E2 PWR_ON, E3 PQ2, E4 PQ1, E5 PQ0, E6 OTG2_ID, G3 NRST, G4 BOOT0, G5 PQ7, P5 CSI_REXT, T3 CSI_CKP, T4 CSI_D1P, T5 CSI_D0P, U3 CSI_CKN, U4 CSI_D1N, U5 CSI_D0N
part C pins: A4 VDD33USB, A17 VSS, C5 VDDA18USB, E1 VBAT, E8 VDDIO4, E9 VDDIO5, F1 V08CAP, F2 VSSAPMU, F6 VDDA18AON, F7 VSS, F8 VDDIO4, F9 VDDIO5, F10 VSS, F11 VSS, F12 VSS, G1 VDDA18PMU, G2 VFBSMPS, G6 VSSAON, G12 VSS, G13 VDD, H1 VSSSMPS, H2 VSSSMPS, H3 VSSSMPS, H4 VSSSMPS, H5 VSSSMPS, H6 VSSSMPS, H12 VDD, H13 VDD, J1 VLXSMPS, J2 VLXSMPS, J3 VLXSMPS, J4 VLXSMPS, J5 VLXSMPS, J6 VLXSMPS, J12 VDD, J13 VDD, K1 VDDSMPS, K2 VDDSMPS, K3 VDDSMPS, K4 VDDSMPS, K5 VDDSMPS, K6 VDDSMPS, K12 VSS, K13 VDD, L6 VDDCORE, L12 VDDCORE, L13 VDDIO2, L14 VDDIO2, M5 VDDA18PLL, M6 VSSA, M7 VDDCORE, M8 VSS, M9 VDDCORE, M10 VSS, M11 VDDCORE, M12 VSS, M13 VSS, M14 VDDIO2, M15 VDDIO2, N5 VSS, N6 VDDA18ADC, N7 VSS, N8 VDDCORE, N9 VSS, N10 VDDCORE, N11 VSS, N12 VDDCORE, N13 VDDIO3, P11 VDDCORE, P13 VDDIO3, R4 VDDCSI, R5 VDDA18CSI, T2 VREF-, U1 VSS, U2 VREF+, U17 VSS

## STM32N657Z0H3Q
designator U?
Arm Cortex-M55-based MCU, with ST Neural-ART Accelerator, H264 encoder, Neo-Chrom 2.5D GPU, 4.2 Mbytes contiguous SRAM; Manufacturer_Name: STMicroelectronics; Geometry.Height: 1mm; Mouser Part Number: 511-STM32N657Z0H3Q; Mouser Price/Stock: https://www.mouser.co.uk/ProductDetail/STMicroelectronics/STM32N657Z0H3Q?qs=a2MtRaTmNORiHKoWPvAi1Q%3D%3D; Manufacturer_Part_Number: STM32N657Z0H3Q; Datasheet Link: https://www.st.com/resource/en/datasheet/stm32n657a0.pdf
footprint STM32N657Z0H3Q
part A pins: A8 PC8, A9 PC10, A10 PC12, A11 PE13, A12 PE7, A13 PE9, A14 PE0, B8 PC9, B9 PC11, B10 PH2, B11 PE12, B12 PD1, B13 PE10, B14 PE1, B15 PE2, C13 PD8, C14 PB0, C15 PE3, D10 PE14, D11 PE15, D12 PE8, D14 PN1, D15 PB6, E2 PC13, E12 PB7, E14 PN4, E15 PN8, F14 PN7, F15 PN5, G14 PN9, G15 PN6, H14 PN10, H15 PN2, J14 PN11, J15 PN0, K1 PF4, K2 PF10, K3 PF5, K14 PN12, K15 PN3, L1 PF2, L2 PF14, L4 PF3, L14 PB4, L15 PA15, M1 PF15, M2 PF7, M11 PA8, M14 PG2, M15 PB5, N1 PF8, N2 PF11, N3 PF13, N13 PB12, N14 PB11, N15 PB10, P1 PF12, P9 PG14, P10 PA12, P11 PA9, P12 PA2, P13 PA6, P14 PA1, P15 PG10, R8 PA14, R9 PA13, R10 PA11, R11 PA10, R12 PA5, R13 PG13, R14 PA0
part B pins: A2 OTG2_ID, A3 OTG2_HS_DM, A4 NC, A5 OTG1_HS_DM, A6 OTG1_TX_RTUNE, A7 PH0_OSC_IN, B1 PC15_OSC32_OUT, B2 BOOT0, B3 OTG2_HS_DP, B4 OTG1_ID, B5 OTG1_HS_DP, B7 PH1_OSC_OUT, C1 PC14_OSC32_IN, C2 NRST, C3 NC, D5 OTG2_TX_RTUNE, D6 UCPD1_C_C1, D7 UCPD1_C_C2, P4 CSI_D1N, P5 CSI_CKN, P6 CSI_D0N, P7 CSI_REX_T, R4 CSI_D1P, R5 CSI_CKP, R6 CSI_D0P
part C pins: A1 PDR_ON, A15 VSS_1, B6 VDD33_USB, D1 VBAT, D2 PWR_ON, D4 VDDA18_USB, D8 VDDIO4, D9 VSS_2, E1 V08CAP, E4 VDDA18_AON, F1 VDDA18_PMU, F2 VSS_APMU, F3 VFB_SMPS, F4 VSSAON, F12 VDD_1, G1 VSS_SMPS_1, G2 VSS_SMPS_2, G3 VSS_SMPS_3, G12 VDD_2, H1 VLXSMPS_1, H2 VLXSMPS_2, H3 VLXSMPS_3, H12 VDD_3, J1 VDD_SMPS_1, J2 VDD_SMPS_2, J3 VDD_SMPS_3, J12 VSS_3, K4 VDDA18_PLL, K12 VDDIO3_1, L12 VDDIO3_2, M4 VSS_4, M5 VDDCORE_1, M6 VDDCORE_2, M7 VDDCORE_3, M8 VDDCORE_4, M9 VDDCORE_5, M10 VSS_5, M12 VSS_6, P2 VREF+, P3 VSSA, P8 VDDCSI, R1 VSS_7, R2 VREF-, R3 VDDA18_ADC, R7 VDDA18_CSI, R15 VSS_8

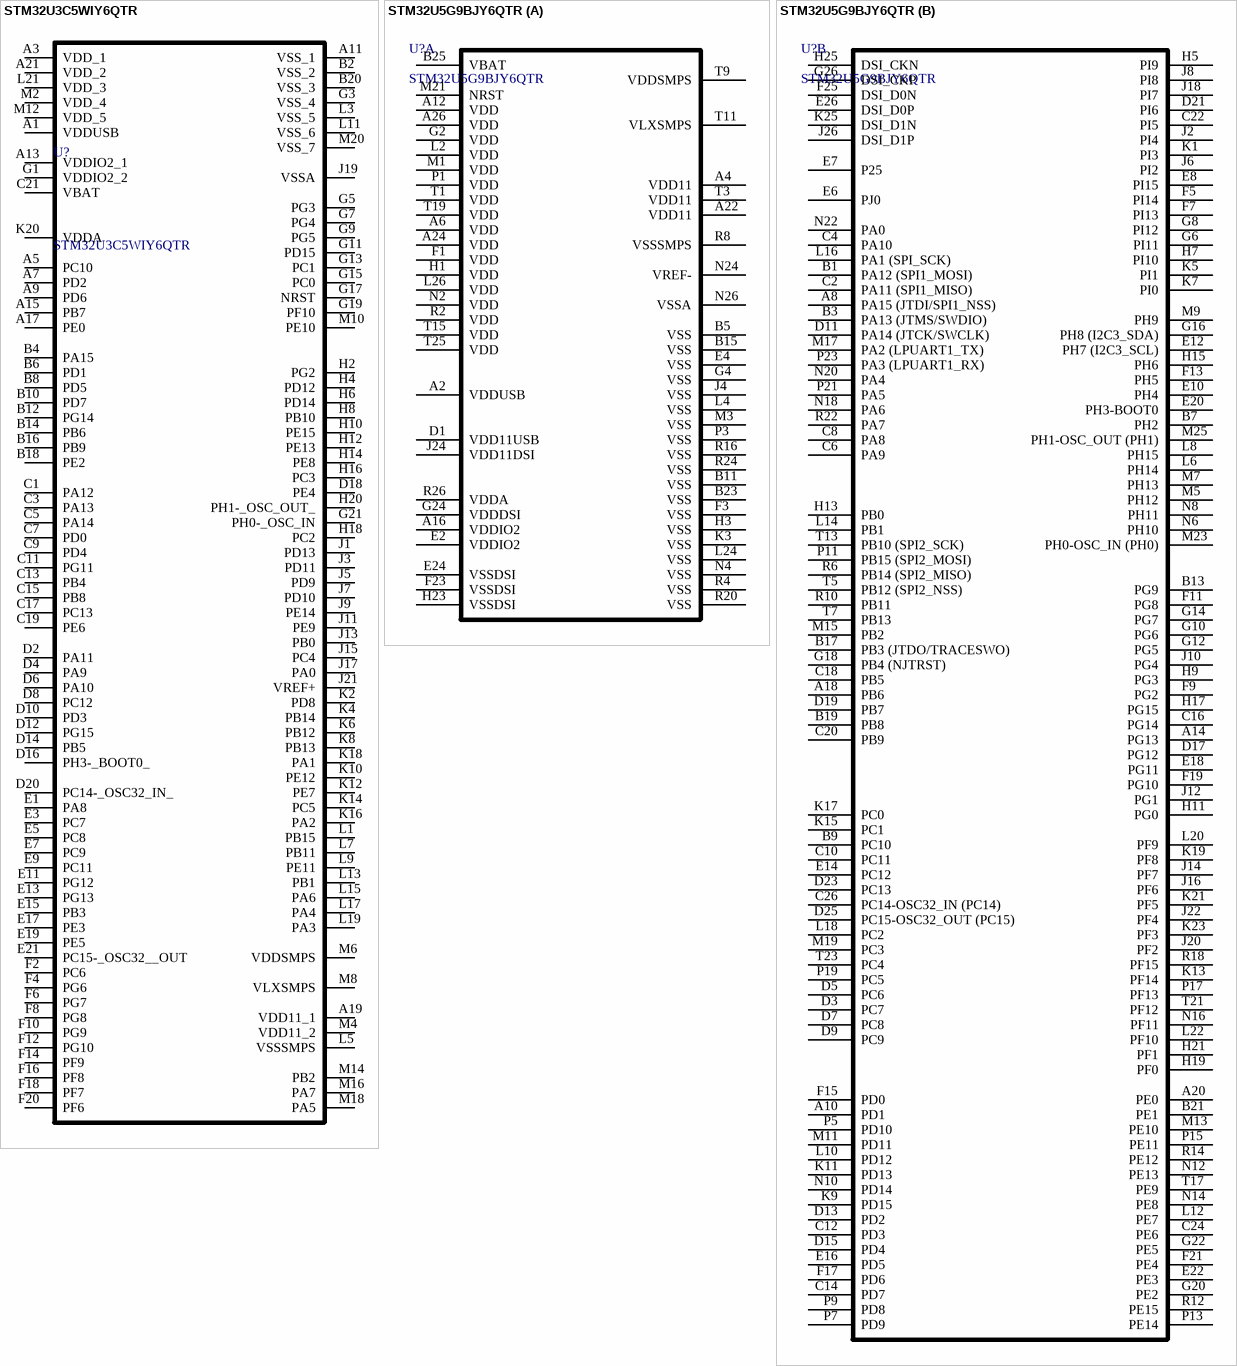
[diagram p14: symbols STM32U3C5WIY6QTR to STM32U5G9BJY6QTR]

## STM32U3C5WIY6QTR
designator U?
Ultra-low-power Arm Cortex-M33 32-bit MCU+TrustZone+FPU, 395 CoreMark, 2 MB flash memory, 640 KB SRAM, SMPS, crypto, 1.71 V to 3.6 V -40 C to +105 C; Manufacturer_Name: STMicroelectronics; Geometry.Height: 0.52mm; Manufacturer_Part_Number: STM32U3C5WIY6QTR; Mouser Part Number: *; Mouser Price/Stock: *; Arrow Part Number: *; Arrow Price/Stock: *; Datasheet Link: https://www.st.com/resource/en/datasheet/stm32u3c5ci.pdf
footprint STM32U3C5WIY6QTR
pins: A1 VDDUSB, A3 VDD_1, A5 PC10, A7 PD2, A9 PD6, A11 VSS_1, A13 VDDIO2_1, A15 PB7, A17 PE0, A19 VDD11_1, A21 VDD_2, B2 VSS_2, B4 PA15, B6 PD1, B8 PD5, B10 PD7, B12 PG14, B14 PB6, B16 PB9, B18 PE2, B20 VSS_3, C1 PA12, C3 PA13, C5 PA14, C7 PD0, C9 PD4, C11 PG11, C13 PB4, C15 PB8, C17 PC13, C19 PE6, C21 VBAT, D2 PA11, D4 PA9, D6 PA10, D8 PC12, D10 PD3, D12 PG15, D14 PB5, D16 PH3-_BOOT0_, D18 PE4, D20 PC14-_OSC32_IN_, E1 PA8, E3 PC7, E5 PC8, E7 PC9, E9 PC11, E11 PG12, E13 PG13, E15 PB3, E17 PE3, E19 PE5, E21 PC15-_OSC32__OUT, F2 PC6, F4 PG6, F6 PG7, F8 PG8, F10 PG9, F12 PG10, F14 PF9, F16 PF8, F18 PF7, F20 PF6, G1 VDDIO2_2, G3 VSS_4, G5 PG3, G7 PG4, G9 PG5, G11 PD15, G13 PC1, G15 PC0, G17 NRST, G19 PF10, G21 PH0-_OSC_IN, H2 PG2, H4 PD12, H6 PD14, H8 PB10, H10 PE15, H12 PE13, H14 PE8, H16 PC3, H18 PC2, H20 PH1-_OSC_OUT_, J1 PD13, J3 PD11, J5 PD9, J7 PD10, J9 PE14, J11 PE9, J13 PB0, J15 PC4, J17 PA0, J19 VSSA, J21 VREF+, K2 PD8, K4 PB14, K6 PB12, K8 PB13, K10 PE12, K12 PE7, K14 PC5, K16 PA2, K18 PA1, K20 VDDA, L1 PB15, L3 VSS_5, L5 VSSSMPS, L7 PB11, L9 PE11, L11 VSS_6, L13 PB1, L15 PA6, L17 PA4, L19 PA3, L21 VDD_3, M2 VDD_4, M4 VDD11_2, M6 VDDSMPS, M8 VLXSMPS, M10 PE10, M12 VDD_5, M14 PB2, M16 PA7, M18 PA5, M20 VSS_7

## STM32U5G9BJY6QTR
designator U?
MCU 32-bit ARM Cortex M33 RISC 4MB Flash 1.8V/2.5V/3.3V 208-Pin WLCSP T/R; Manufacturer: STMicroelectronics; Supplier 1: DigiKey; Supplier Part Number 1: 497-STM32U5G9BJY6QTRCT-ND; Supplier 2: DigiKey; Supplier Part Number 2: 497-STM32U5G9BJY6QTRDKR-ND; Supplier 3: Mouser; Supplier Part Number 3: 511-STM32U5G9BJY6QTR; Supplier: DigiKey; Supplier Part Number: 497-STM32U5G9BJY6QTRCT-ND; Manufacturer Part Number: STM32U5G9BJY6QTR; RoHS: Compliant; Category: Microcontrollers; Stock: 5913; Pricing: 1=18,37, 10=14,601, 25=13,6604, 100=12,6258, 250=12,60676 (USD); Export Control Classification Number (ECCN) Code: 5A992.C; Harmonized Tariff Schedule (HTS) Code: 8542.31.00.30; Introduction Date: 2023-10-19; Lifecycle Status: Production; REACH SVHC: Yes
footprint STM32U5G9BJY6QTR
part A pins: A2 VDDUSB, A4 VDD11, A6 VDD, A12 VDD, A16 VDDIO2, A22 VDD11, A24 VDD, A26 VDD, B5 VSS, B11 VSS, B15 VSS, B23 VSS, B25 VBAT, D1 VDD11USB, E2 VDDIO2, E4 VSS, E24 VSSDSI, F1 VDD, F3 VSS, F23 VSSDSI, G2 VDD, G4 VSS, G24 VDDDSI, H1 VDD, H3 VSS, H23 VSSDSI, J4 VSS, J24 VDD11DSI, K3 VSS, L2 VDD, L4 VSS, L24 VSS, L26 VDD, M1 VDD, M3 VSS, M21 NRST, N2 VDD, N4 VSS, N24 VREF-, N26 VSSA, P1 VDD, P3 VSS, R2 VDD, R4 VSS, R8 VSSSMPS, R16 VSS, R20 VSS, R24 VSS, R26 VDDA, T1 VDD, T3 VDD11, T9 VDDSMPS, T11 VLXSMPS, T15 VDD, T19 VDD, T25 VDD
part B pins: A8 PA15 (JTDI/SPI1_NSS), A10 PD1, A14 PG13, A18 PB6, A20 PE0, B1 PA12 (SPI1_MOSI), B3 PA13 (JTMS/SWDIO), B7 PH2, B9 PC10, B13 PG9, B17 PB3 (JTDO/TRACESWO), B19 PB8, B21 PE1, C2 PA11 (SPI1_MISO), C4 PA10, C6 PA9, C8 PA8, C10 PC11, C12 PD3, C14 PD7, C16 PG14, C18 PB5, C20 PB9, C22 PI5, C24 PE6, C26 PC14-OSC32_IN (PC14), D3 PC7, D5 PC6, D7 PC8, D9 PC9, D11 PA14 (JTCK/SWCLK), D13 PD2, D15 PD4, D17 PG12, D19 PB7, D21 PI6, D23 PC13, D25 PC15-OSC32_OUT (PC15), E6 PJ0, E7 P25, E8 PI15, E10 PH4, E12 PH7 (I2C3_SCL), E14 PC12, E16 PD5, E18 PG11, E20 PH3-BOOT0, E22 PE3, E26 DSI_D0P, F5 PI14, F7 PI13, F9 PG2, F11 PG8, F13 PH5, F15 PD0, F17 PD6, F19 PG10, F21 PE4, F25 DSI_D0N, G6 PI11, G8 PI12, G10 PG6, G12 PG5, G14 PG7, G16 PH8 (I2C3_SDA), G18 PB4 (NJTRST), G20 PE2, G22 PE5, G26 DSI_CKP, H5 PI9, H7 PI10, H9 PG3, H11 PG0, H13 PB0, H15 PH6, H17 PG15, H19 PF0, H21 PF1, H25 DSI_CKN, J2 PI4, J6 PI2, J8 PI8, J10 PG4, J12 PG1, J14 PF7, J16 PF6, J18 PI7, J20 PF2, J22 PF4, J26 DSI_D1P, K1 PI3, K5 PI1, K7 PI0, K9 PD15, K11 PD13, K13 PF14, K15 PC1, K17 PC0, K19 PF8, K21 PF5, K23 PF3, K25 DSI_D1N, L6 PH14, L8 PH15, L10 PD12, L12 PE7, L14 PB1, L16 PA1 (SPI_SCK), L18 PC2, L20 PF9, L22 PF10, M5 PH12, M7 PH13, M9 PH9, M11 PD11, M13 PE10, M15 PB2, M17 PA2 (LPUART1_TX), M19 PC3, M23 PH0-OSC_IN (PH0), M25 PH1-OSC_OUT (PH1), N6 PH10, N8 PH11, N10 PD14, N12 PE13, N14 PE8, N16 PF11, N18 PA6, N20 PA4, N22 PA0, P5 PD10, P7 PD9, P9 PD8, P11 PB15 (SPI2_MOSI), P13 PE14, P15 PE11, P17 PF13, P19 PC5, P21 PA5, P23 PA3 (LPUART1_RX), R6 PB14 (SPI2_MISO), R10 PB11, R12 PE15, R14 PE12, R18 PF15, R22 PA7, T5 PB12 (SPI2_NSS), T7 PB13, T13 PB10 (SPI2_SCK), T17 PE9, T21 PF12, T23 PC4

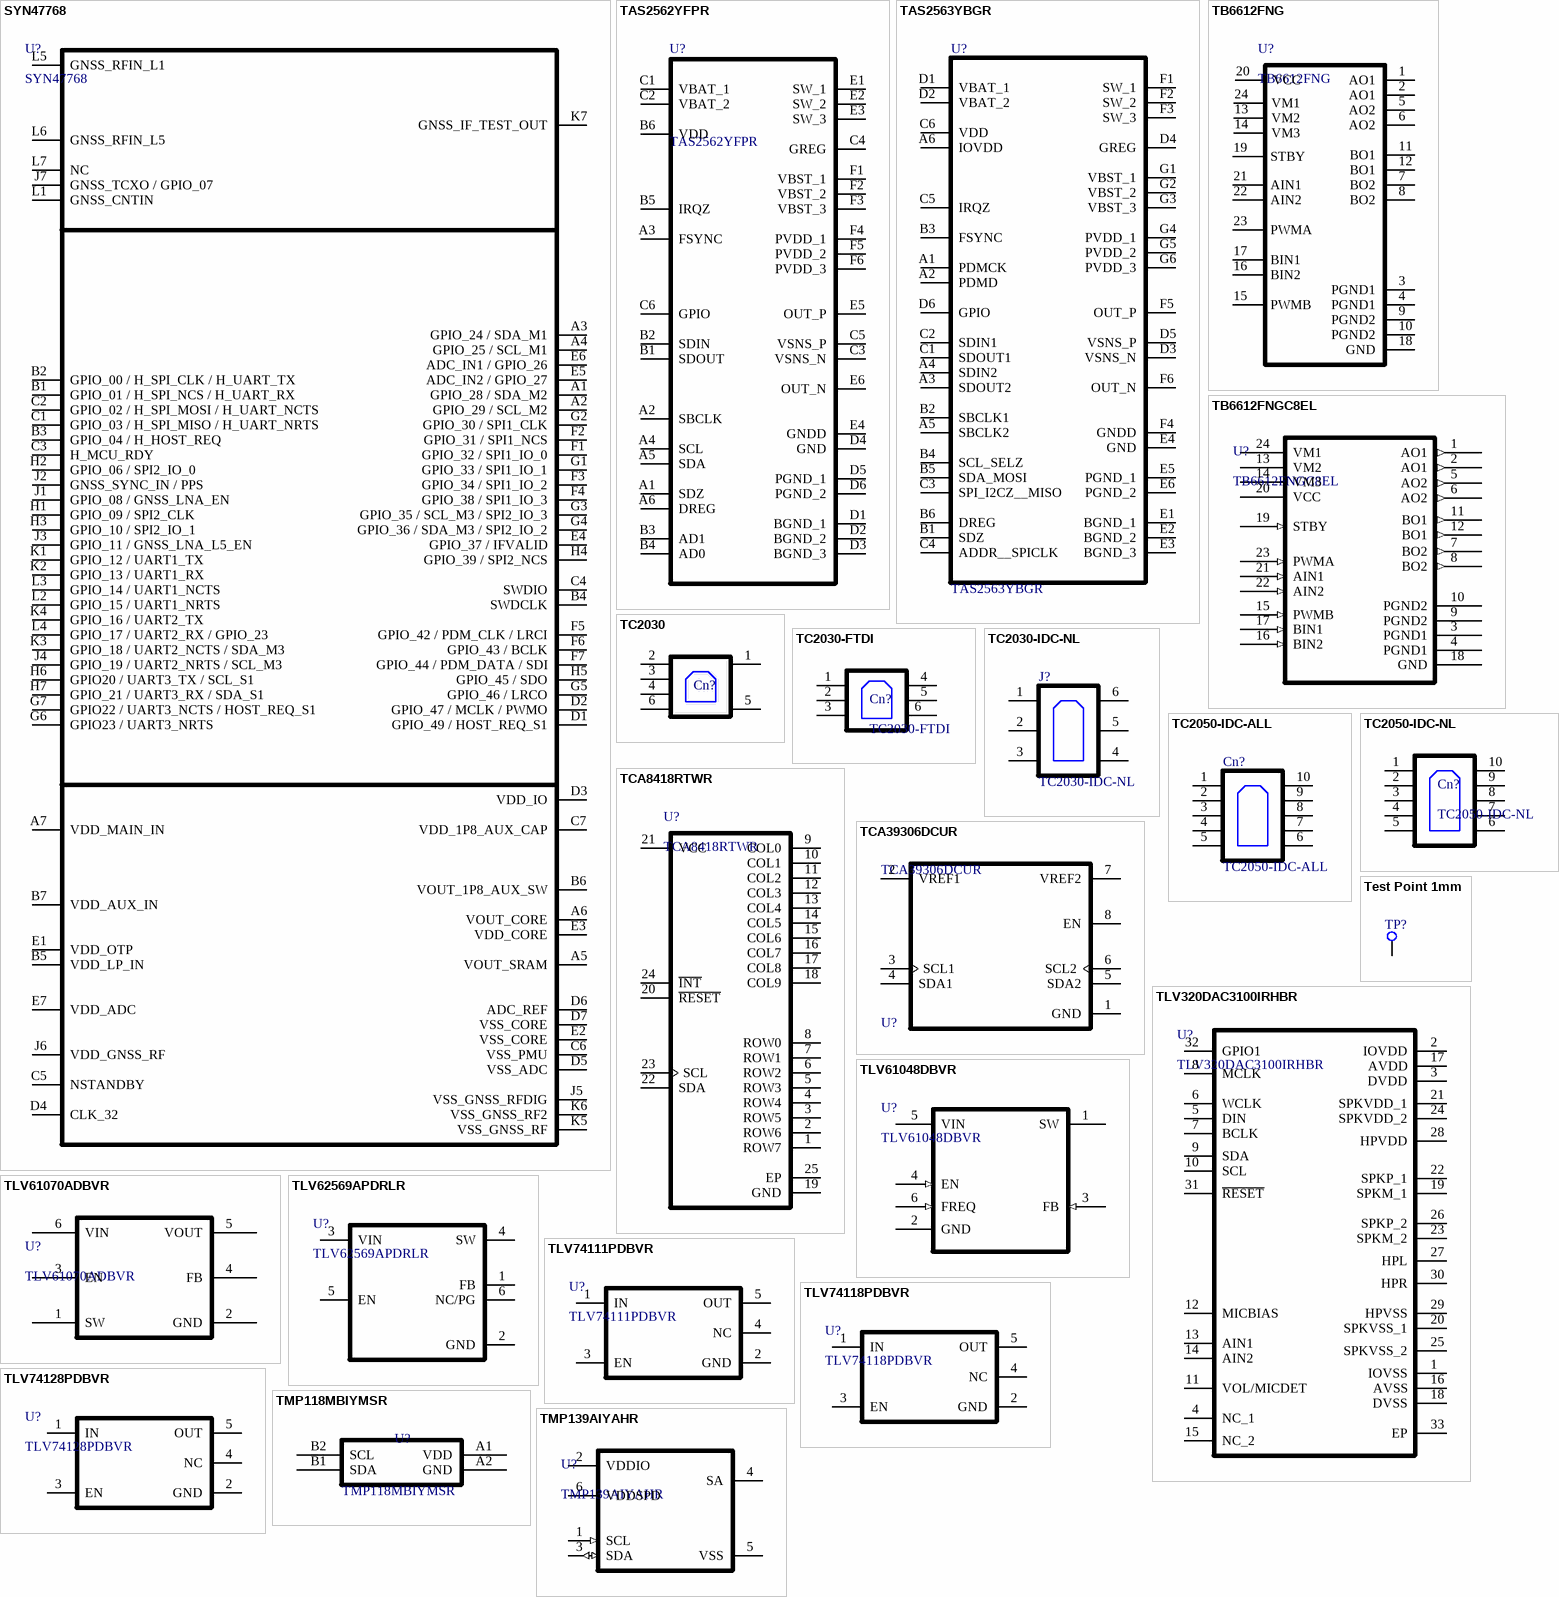
[diagram p15: symbols SYN47768 to TMP139AIYAHR]

## SYN47768
designator U?
footprint BGA77C35P7X11_253X392X53 (BGA, 77-Leads, Body 2.53x3.92mmx0.53mm, Pitch 0.35mm)
pins: A1 GPIO_28 / SDA_M2, A2 GPIO_29 / SCL_M2, A3 GPIO_24 / SDA_M1, A4 GPIO_25 / SCL_M1, A5 VOUT_SRAM, A6 VOUT_CORE, A7 VDD_MAIN_IN, B1 GPIO_01 / H_SPI_NCS / H_UART_RX, B2 GPIO_00 / H_SPI_CLK / H_UART_TX, B3 GPIO_04 / H_HOST_REQ, B4 SWDCLK, B5 VDD_LP_IN, B6 VOUT_1P8_AUX_SW, B7 VDD_AUX_IN, C1 GPIO_03 / H_SPI_MISO / H_UART_NRTS, C2 GPIO_02 / H_SPI_MOSI / H_UART_NCTS, C3 H_MCU_RDY, C4 SWDIO, C5 NSTANDBY, C6 VSS_PMU, C7 VDD_1P8_AUX_CAP, D1 GPIO_49 / HOST_REQ_S1, D2 GPIO_47 / MCLK / PWMO, D3 VDD_IO, D4 CLK_32, D5 VSS_ADC, D6 ADC_REF, D7 VSS_CORE, E1 VDD_OTP, E2 VSS_CORE, E3 VDD_CORE, E4 GPIO_37 / IFVALID, E5 ADC_IN2 / GPIO_27, E6 ADC_IN1 / GPIO_26, E7 VDD_ADC, F1 GPIO_32 / SPI1_IO_0, F2 GPIO_31 / SPI1_NCS, F3 GPIO_34 / SPI1_IO_2, F4 GPIO_38 / SPI1_IO_3, F5 GPIO_42 / PDM_CLK / LRCI, F6 GPIO_43 / BCLK, F7 GPIO_44 / PDM_DATA / SDI, G1 GPIO_33 / SPI1_IO_1, G2 GPIO_30 / SPI1_CLK, G3 GPIO_35 / SCL_M3 / SPI2_IO_3, G4 GPIO_36 / SDA_M3 / SPI2_IO_2, G5 GPIO_46 / LRCO, G6 GPIO23 / UART3_NRTS, G7 GPIO22 / UART3_NCTS / HOST_REQ_S1, H1 GPIO_09 / SPI2_CLK, H2 GPIO_06 / SPI2_IO_0, H3 GPIO_10 / SPI2_IO_1, H4 GPIO_39 / SPI2_NCS, H5 GPIO_45 / SDO, H6 GPIO20 / UART3_TX / SCL_S1, H7 GPIO_21 / UART3_RX / SDA_S1, J1 GPIO_08 / GNSS_LNA_EN, J2 GNSS_SYNC_IN / PPS, J3 GPIO_11 / GNSS_LNA_L5_EN, J4 GPIO_19 / UART2_NRTS / SCL_M3, J5 VSS_GNSS_RFDIG, J6 VDD_GNSS_RF, J7 GNSS_TCXO / GPIO_07, K1 GPIO_12 / UART1_TX, K2 GPIO_13 / UART1_RX, K3 GPIO_18 / UART2_NCTS / SDA_M3, K4 GPIO_16 / UART2_TX, K5 VSS_GNSS_RF, K6 VSS_GNSS_RF2, K7 GNSS_IF_TEST_OUT, L1 GNSS_CNTIN, L2 GPIO_15 / UART1_NRTS, L3 GPIO_14 / UART1_NCTS, L4 GPIO_17 / UART2_RX / GPIO_23, L5 GNSS_RFIN_L1, L6 GNSS_RFIN_L5, L7 NC

## TAS2562YFPR
designator U?
6.1 W Digital Input Class-D Smart Amp with I/V Sense for Speaker Protection and Integrated 11 V Clas; Manufacturer_Name: Texas Instruments; Geometry.Height: 0.5mm; Manufacturer_Part_Number: TAS2562YFPR; Mouser Part Number: 595-TAS2562YFPR; Mouser Price/Stock: https://www.mouser.co.uk/ProductDetail/Texas-Instruments/TAS2562YFPR?qs=byeeYqUIh0Mj2mDXQCvFDg%3D%3D; Arrow Part Number: TAS2562YFPR; Arrow Price/Stock: https://www.arrow.com/en/products/tas2562yfpr/texas-instruments?utm_currency=USD&region=nac; Datasheet Link: http://www.ti.com/lit/gpn/TAS2562
footprint BGA36C40P6X6_241X243X50
pins: A1 SDZ, A2 SBCLK, A3 FSYNC, A4 SCL, A5 SDA, A6 DREG, B1 SDOUT, B2 SDIN, B3 AD1, B4 AD0, B5 IRQZ, B6 VDD, C1 VBAT_1, C2 VBAT_2, C3 VSNS_N, C4 GREG, C5 VSNS_P, C6 GPIO, D1 BGND_1, D2 BGND_2, D3 BGND_3, D4 GND, D5 PGND_1, D6 PGND_2, E1 SW_1, E2 SW_2, E3 SW_3, E4 GNDD, E5 OUT_P, E6 OUT_N, F1 VBST_1, F2 VBST_2, F3 VBST_3, F4 PVDD_1, F5 PVDD_2, F6 PVDD_3

## TAS2563YBGR
designator U?
6.1W Digital Input Smart Amp with Integrated Speaker Protection, Advanced EQ and 11V Class-H Boost; Manufacturer_Name: Texas Instruments; Geometry.Height: 0.5mm; Manufacturer_Part_Number: TAS2563YBGR; Mouser Part Number: 595-TAS2563YBGR; Mouser Price/Stock: https://www.mouser.co.uk/ProductDetail/Texas-Instruments/TAS2563YBGR?qs=EBDBlbfErPwV5wQnaCTpkA%3D%3D; Arrow Part Number: TAS2563YBGR; Arrow Price/Stock: https://www.arrow.com/en/products/tas2563ybgr/texas-instruments?region=nac; Datasheet Link: http://www.ti.com/lit/gpn/TAS2563
footprint BGA42C40P6X7_250X296X50
pins: A1 PDMCK, A2 PDMD, A3 SDOUT2, A4 SDIN2, A5 SBCLK2, A6 IOVDD, B1 SDZ, B2 SBCLK1, B3 FSYNC, B4 SCL_SELZ, B5 SDA_MOSI, B6 DREG, C1 SDOUT1, C2 SDIN1, C3 SPI_I2CZ__MISO, C4 ADDR__SPICLK, C5 IRQZ, C6 VDD, D1 VBAT_1, D2 VBAT_2, D3 VSNS_N, D4 GREG, D5 VSNS_P, D6 GPIO, E1 BGND_1, E2 BGND_2, E3 BGND_3, E4 GND, E5 PGND_1, E6 PGND_2, F1 SW_1, F2 SW_2, F3 SW_3, F4 GNDD, F5 OUT_P, F6 OUT_N, G1 VBST_1, G2 VBST_2, G3 VBST_3, G4 PVDD_1, G5 PVDD_2, G6 PVDD_3

## TB6612FNG
designator U?
Driver IC for Dual DC Motor, 15 V, -20 to 85 degC, 24-Pin SSOP, RoHS, Tape and Reel; Manufacturer: Toshiba; Manufacturer Part Number: TB6612FNG(O,C,8,EL; Manufacturer Package Identifier: SSOP24-P-300-0.65A; Interface: Parallel; Max Output current: 1A; Max Power Dissipation: 1.36W; Max Supply Current: 2.2mA; Max Supply Voltage: 5.5V; Min Supply Voltage: 2.7V; Motor Type: Brushed; Nominal Supply Voltage (DC): 3V; Number of Channels: 2; Output Voltage: 15V; Switching Frequency: 100kHz; Supplier: Newark; Supplier Part Number: TB6612FNG(O,C,8,EL; RoHS: Compliant; Category: Motor Drivers; Stock: 1202; Pricing: 1=2,72, 10=2,39, 25=2,16, 50=1,93, 100=1,69, 250=1,45, 500=1,31, 1000=1,25 (USD); Case/Package: LSSOP; Export Control Classification Number (ECCN) Code: EAR99; Height: 1.6mm; Height - Seated (Max): 1.6mm; Harmonized Tariff Schedule (HTS) Code: 8542.39.00.60; Introduction Date: 2014-12-16; Length: 7.8mm; Lifecycle Status: Production; Logic Function: AND; Max Operating Temperature: 85°C; Min Operating Temperature: -20°C; Mounting Technology: Surface Mount; Number of Circuits: 2; Number of Outputs: 2; Pins: 24; Number of Terminals: 24; Output Current: 1A; Packaging: Cut Tape (CT); REACH SVHC: Yes; Schedule B: 8542390000, 8542390000|8542390000|8542390000|8542390000|8542390000|8542390000|8542390000|8542390000|8542390000|8542390000|8542390000|8542390000|8542390000|8542390000|8542390000|8542390000|8542390000|8542390000|8542390000|8542390000|8542390000|8542390000|8542390000|85; Terminal Pitch: 650µm; Width: 5.6mm; ComponentLink1URL: https://datasheet.octopart.com:443/TB6612FNG%28O%2CC%2C8%2CEL-Toshiba-datasheet-137045272.pdf?src-supplier=IHS; ComponentLink1Description: https://datasheet.octopart.com:443/TB6612FNG%28O%2CC%2C8%2CEL-Toshiba-datasheet-137045272.pdf?src-supplier=IHS; ComponentLink2URL: https://datasheet.octopart.com:443/TB6612FNG%28O%2CC8%2CEL%29-Toshiba-datasheet-141427499.pdf?src-supplier=Upverter; ComponentLink2Description: https://datasheet.octopart.com:443/TB6612FNG%28O%2CC8%2CEL%29-Toshiba-datasheet-141427499.pdf?src-supplier=Upverter; ComponentLink3URL: https://datasheet.octopart.com/TB6612FNG%2CC%2C8%2CEL-Toshiba-datasheet-32979960.pdf; ComponentLink3Description: https://datasheet.octopart.com/TB6612FNG%2CC%2C8%2CEL-Toshiba-datasheet-32979960.pdf; ComponentLink4URL: https://datasheet.octopart.com/TB6612FNG%28O%2CC%2C8%2CEL-Toshiba-datasheet-13326806.pdf; ComponentLink4Description: https://datasheet.octopart.com/TB6612FNG%28O%2CC%2C8%2CEL-Toshiba-datasheet-13326806.pdf; Supplier 1: DigiKey; Supplier Part Number 1: TB6612FNGC8ELDKR-ND; Supplier 2: DigiKey; Supplier Part Number 2: TB6612FNGC8ELCT-ND; Supplier 3: Mouser; Supplier Part Number 3: 757-TB6612FNGC8EL
footprint TOSH-SSOP-24_N (SOP, 24-Leads, Body 8x5.8mm, Pitch 0.65mm, IPC Medium Density)
footprint TOSH-SSOP-24_L (SOP, 24-Leads, Body 8x5.8mm, Pitch 0.65mm, IPC High Density)
footprint TOSH-SSOP-24_M (SOP, 24-Leads, Body 8x5.8mm, Pitch 0.65mm, IPC Low Density)
pins: 1 AO1 "chA output1", 2 AO1 "chA output1", 3 PGND1 "Power GND 1", 4 PGND1 "Power GND 1", 5 AO2 "chA output2", 6 AO2 "chA output2", 7 BO2 "chB output2", 8 BO2 "chB output2", 9 PGND2 "Power GND 2", 10 PGND2 "Power GND 2", 11 BO1 "chB output1", 12 BO1 "chB output1", 13 VM2 "Motor supply(2.5V~13.5V)", 14 VM3 "Motor supply(2.5V~13.5V)", 15 PWMB "chB PWM input / 200kohm pull-down at internal", 16 BIN2 "chB input2 / 200kohm pull-down at internal", 17 BIN1 "chB input1 / 200kohm pull-down at internal", 18 GND "Small signal GND", 19 STBY "“L”=standby / 200kohm pull-down at internal", 20 VCC "Small signal supply (2.7V~5.5V)", 21 AIN1 "chA input2 / 200kohm pull-down at internal", 22 AIN2 "chA input1 / 200kohm pull-down at internal", 23 PWMA "chA PWM input / 200kohm pull-down at internal", 24 VM1 "Motor supply(2.5V~13.5V)"

## TB6612FNGC8EL
designator U?
Description; Manufacturer_Name: Toshiba Electronic Devices & Storage Corp.; Manufacturer_Part_Number: TB6612FNG,C,8,EL; Copyright: Copyright (C) 2025 Ultra Librarian. All rights reserved.; RefDes: RefDes; Type: Type
footprint SSOP24-P-300-0p65A_TOS
pins: 1 AO1 (out), 2 AO1 (out), 3 PGND1 (power), 4 PGND1 (power), 5 AO2 (out), 6 AO2 (out), 7 BO2 (out), 8 BO2 (out), 9 PGND2 (power), 10 PGND2 (power), 11 BO1 (out), 12 BO1 (out), 13 VM2 (power), 14 VM3 (power), 15 PWMB (in), 16 BIN2 (in), 17 BIN1 (in), 18 GND (power), 19 STBY (in), 20 VCC (power), 21 AIN1 (in), 22 AIN2 (in), 23 PWMA (in), 24 VM1 (power)

## TC2030
designator Cn?, comment TC2030-IDC-ALL  (value not drawn)  (no BOM)
Plug-Of-Nails SMD 6POS 1.27MM; Manufacturer: Tag-Connect; Manufacturer Part Number: TC2030-MCP-NL; Number of Contacts: 6; Shielding: Unshielded; Supplier: DigiKey; Supplier Part Number: TC2030-MCP-NLTC-ND; RoHS: Compliant; Category: Cables and Wire; Stock: 809; Pricing: 1=36 (USD); Lead Free: Lead Free; REACH SVHC: Yes; ComponentLink1URL: https://datasheet.octopart.com:443/TC2030-MCP-NL-Tag-Connect-datasheet-181254555.pdf?src-supplier=IHS; ComponentLink1Description: https://datasheet.octopart.com:443/TC2030-MCP-NL-Tag-Connect-datasheet-181254555.pdf?src-supplier=IHS; ComponentLink2URL: https://datasheet.octopart.com:443/TC2030-MCP-NL-Tag-Connect-datasheet-17049191.pdf?src-supplier=Factory+Futures; ComponentLink2Description: https://datasheet.octopart.com:443/TC2030-MCP-NL-Tag-Connect-datasheet-17049191.pdf?src-supplier=Factory+Futures
footprint TAG-CONNECT-TC2030
pins: 1, 2, 3, 4, 5, 6, A1 1 hidden, A2 1 hidden, A3 1 hidden, L1 1 hidden, L2 1 hidden, L3 1 hidden, L4 1 hidden

## TC2030-FTDI
designator Cn?
Plug-Of-Nails SMD 6POS 1.27MM; Manufacturer: Tag-Connect; Supplier 1: Digikey; Supplier Part Number 1: SAM8796-ND; Manufacturer Part Number: TC2030-FTDI
footprint TAG-CONNECT_TC2030-FTDI
pins: 1, 2, 3, 4, 5, 6

## TC2030-IDC-NL
designator J?  (no BOM)
Plug-Of-Nails SMD 6POS 1.27MM; Supplier 1: Digikey; Supplier Part Number 1: SAM8796-ND
footprint TAG-CONNECT_TC2030-IDC-NL (2x3 tag connect)
pins: 1, 2, 3, 4, 5, 6

## TC2050-IDC-ALL
designator Cn?  (no BOM)
Plug-Of-Nails SMD 10POS 1.27MM; Supplier 1: Digikey; Supplier Part Number 1: SAM8796-ND
footprint TAG-CONNECT_TC2050-IDC-NL
pins: 1, 2, 3, 4, 5, 6, 7, 8, 9, 10

## TC2050-IDC-NL
designator Cn?
Plug-Of-Nails SMD 10POS 1.27MM; Manufacturer: Tag-Connect; Supplier 1: Digikey; Supplier Part Number 1: SAM8796-ND; Manufacturer Part Number: TC2050-IDC-NL
footprint TAG-CONNECT_TC2050-IDC-NL
pins: 1, 2, 3, 4, 5, 6, 7, 8, 9, 10